# Altium integrated library arm_board_2024_final.IntLib: 23 symbols
Pins are listed as number, name and electrical type; pins without a type are passive.

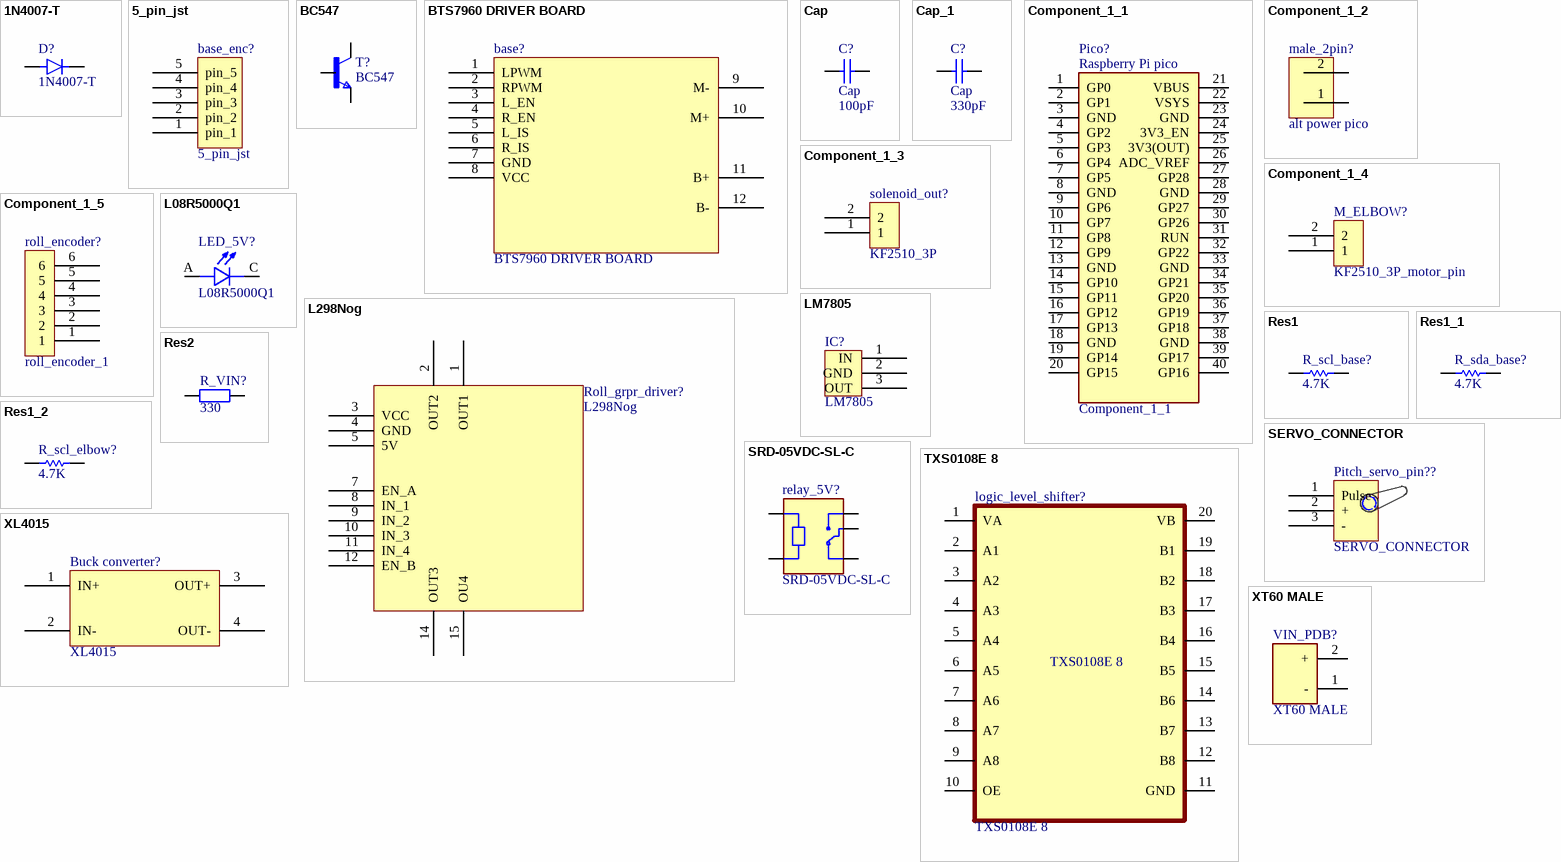
[diagram p0: symbols 1N4007-T to XT60 MALE]

## 1N4007-T
designator D?
Diode Standard 1A 1000V 1Vf DO41 | Diodes Inc 1N4007-T; MF: Diodes Incorporated; SnapEDA_Link: https://www.snapeda.com/parts/1N4007-T/Diodes+Inc./view-part/?ref=snap; Package: DO-41 Diodes Inc.; Value: *; MP: 1N4007-T; Check_prices: https://www.snapeda.com/parts/1N4007-T/Diodes+Inc./view-part/?ref=eda
footprint DIOAD780W78L463D236
pins: A, K

## 5_pin_jst
designator base_enc?
footprint 5pin_jst
pins: 1 pin_1, 2 pin_2, 3 pin_3, 4 pin_4, 5 pin_5

## BC547
designator T?
Trans GP BJT NPN 45V 0.1A 500mW 3-Pin TO-92 T/R; MF: ON Semiconductor; SnapEDA_Link: https://www.snapeda.com/parts/BC547/Onsemi/view-part/?ref=snap; Package: None; Value: *; MP: BC547; Check_prices: https://www.snapeda.com/parts/BC547/Onsemi/view-part/?ref=eda
footprint TO92
pins: 1 C, 2 B, 3 E

## BTS7960 DRIVER BOARD
designator base?
MOTOR DRIVER, 12 PIN
footprint BTS7960_DRIVER_BOARD
pins: 1 LPWM, 2 RPWM, 3 L_EN, 4 R_EN, 5 L_IS, 6 R_IS, 7 GND, 8 VCC, 9 M-, 10 M+, 11 B+, 12 B-

## Cap
designator C?  value 100pF
Capacitor; Published: 8-Jun-2000; LatestRevisionDate: 17-Jul-2002; LatestRevisionNote: Re-released for DXP Platform.; PackageReference: RAD-0.3; Publisher: Altium Limited; PackageDescription: Radial Cap, Thru-Hole; 2 Leads; 0.3 in Pin Spacing
footprint RAD-0.3 (Radial Cap, Thru-Hole; 2 Leads; 0.3 in Pin Spacing)
simulation model CAP (Capacitor)
signal-integrity model Cap
pins: 1, 2

## Cap_1
designator C?, comment Cap  value 330pF
Capacitor; Published: 8-Jun-2000; LatestRevisionDate: 17-Jul-2002; LatestRevisionNote: Re-released for DXP Platform.; PackageReference: RAD-0.3; Publisher: Altium Limited; PackageDescription: Radial Cap, Thru-Hole; 2 Leads; 0.3 in Pin Spacing
footprint RAD-0.3 (Radial Cap, Thru-Hole; 2 Leads; 0.3 in Pin Spacing)
simulation model CAP (Capacitor)
signal-integrity model Cap
pins: 1, 2

## Component_1_1
designator Pico?
footprint PCBComponent_1 - duplicate
pins: 1 GP0, 2 GP1, 3 GND, 4 GP2, 5 GP3, 6 GP4, 7 GP5, 8 GND, 9 GP6, 10 GP7, 11 GP8, 12 GP9, 13 GND, 14 GP10, 15 GP11, 16 GP12, 17 GP13, 18 GND, 19 GP14, 20 GP15, 21 VBUS, 22 VSYS, 23 GND, 24 3V3_EN, 25 3V3(OUT), 26 ADC_VREF, 27 GP28, 28 GND, 29 GP27, 30 GP26, 31 RUN, 32 GP22, 33 GND, 34 GP21, 35 GP20, 36 GP19, 37 GP18, 38 GND, 39 GP17, 40 GP16
text: Raspberry Pi pico

## Component_1_2
designator male_2pin?, comment alt power pico
2 pin header
footprint 2pin_header
pins: 1, 2

## Component_1_3
designator solenoid_out?, comment KF2510_3P
footprint PCBComponent_1
pins: 1, 2

## Component_1_4
designator M_ELBOW?, comment KF2510_3P_motor_pin
footprint PCBComponent_1
pins: 1, 2

## Component_1_5
designator roll_encoder?, comment roll_encoder_1
footprint 6PIN_MALE
pins: 1, 2, 3, 4, 5, 6

## L08R5000Q1
designator LED_5V?
LED, 5MM, ORANGE; LED / Lamp Size: 5mm / T-1 3/4; LED Colour: Orange; Typ Luminous Intensity: 4.3mcd; Viewing Angle: ...; MF: LED Technology; Value: *; SnapEDA_Link: https://www.snapeda.com/parts/L08R5000Q1/LED+Technology/view-part/?ref=snap; MP: L08R5000Q1; Check_prices: https://www.snapeda.com/parts/L08R5000Q1/LED+Technology/view-part/?ref=eda; Availability: In Stock; Price: None; Package: None
footprint LEDRD254W57D500H1070
pins: A, C

## L298Nog
designator Roll_grpr_driver?
MOTOR DRIVER BOARD, 15 PIN
footprint l298nog
pins: 1 OUT1, 2 OUT2, 3 VCC, 4 GND, 5 5V, 7 EN_A, 8 IN_1, 9 IN_2, 10 IN_3, 11 IN_4, 12 EN_B, 14 OUT3, 15 OU4

## LM7805
designator IC?
footprint LM7805
pins: 1 IN, 2 GND, 3 OUT

## Res1
designator R_scl_base?, comment value 4.7K  (hidden comment: scl_base)
Resistor; Published: 8-Jun-2000; LatestRevisionDate: 17-Jul-2002; LatestRevisionNote: Re-released for DXP Platform.; PackageReference: AXIAL-0.3; Publisher: Altium Limited; PackageDescription: Axial Device, Thru-Hole; 2 Leads; 0.3 in Pin Spacing
footprint AXIAL-0.3 (Axial Device, Thru-Hole; 2 Leads; 0.3 in Pin Spacing)
simulation model RESISTOR (Resistor)
signal-integrity model Res
pins: 1, 2

## Res1_1
designator R_sda_base?, comment value 4.7K  (hidden comment: Res1)
Resistor; Published: 8-Jun-2000; LatestRevisionDate: 17-Jul-2002; LatestRevisionNote: Re-released for DXP Platform.; PackageReference: AXIAL-0.3; Publisher: Altium Limited; PackageDescription: Axial Device, Thru-Hole; 2 Leads; 0.3 in Pin Spacing
footprint AXIAL-0.3 (Axial Device, Thru-Hole; 2 Leads; 0.3 in Pin Spacing)
simulation model RESISTOR (Resistor)
signal-integrity model Res
pins: 1, 2

## Res1_2
designator R_scl_elbow?  value 4.7K
Resistor; Published: 8-Jun-2000; LatestRevisionDate: 17-Jul-2002; LatestRevisionNote: Re-released for DXP Platform.; PackageReference: AXIAL-0.3; Publisher: Altium Limited; PackageDescription: Axial Device, Thru-Hole; 2 Leads; 0.3 in Pin Spacing
footprint AXIAL-0.3 (Axial Device, Thru-Hole; 2 Leads; 0.3 in Pin Spacing)
simulation model RESISTOR (Resistor)
signal-integrity model Res
pins: 1, 2

## Res2
designator R_VIN?  value 330  (hidden comment: Res2)
Resistor; Published: 8-Jun-2000; LatestRevisionDate: 17-Jul-2002; LatestRevisionNote: Re-released for DXP Platform.; PackageReference: AXIAL-0.4; Publisher: Altium Limited; PackageDescription: Axial Device, Thru-Hole; 2 Leads; 0.4 in Pin Spacing
footprint AXIAL-0.4 (Axial Device, Thru-Hole; 2 Leads; 0.4 in Pin Spacing)
simulation model RESISTOR (Resistor)
signal-integrity model Res
pins: 1, 2

## SERVO_CONNECTOR
designator Pitch_servo_pin??
3 PIN
footprint MALE HEADER 3X1
footprint FEMALE HEADER 3X1
pins: 1 Pulse (power), 2 +, 3 - (power)

## SRD-05VDC-SL-C
designator relay_5V?
5V Trigger Relay Module For Arduino And Raspberry Pi 5V Trigger Relay Module For Arduino And Raspberry Pi; MF: Songle Relay; Check_prices: https://www.snapeda.com/parts/SRD-05VDC-SL-C/Songle+Relay/view-part/?ref=eda; Value: *; Availability: Not in stock; Price: None; Package: NON STANDARD-5 Songle Relay; MP: SRD-05VDC-SL-C; SnapEDA_Link: https://www.snapeda.com/parts/SRD-05VDC-SL-C/Songle+Relay/view-part/?ref=snap
footprint RELAY_SRD-05VDC-SL-C
pins: A1, A2, COM, NC, NO

## TXS0108E 8
designator logic_level_shifter?
8ch logic level converter
footprint llshifter
pins: 1 VA, 2 A1, 3 A2, 4 A3, 5 A4, 6 A5, 7 A6, 8 A7, 9 A8, 10 OE, 11 GND, 12 B8, 13 B7, 14 B6, 15 B5, 16 B4, 17 B3, 18 B2, 19 B1, 20 VB

## XL4015
designator Buck converter?
footprint XL4015_BL
pins: 1 IN+, 2 IN-, 3 OUT+, 4 OUT-

## XT60 MALE
designator VIN_PDB?
CONNECTOR
footprint XT60 MALE
pins: 1 -, 2 +